# Altium footprint library PcbLib.PcbLib: 42 footprints (part 2 of 3)
Each footprint in its own frame and in the unit in brackets; x right, y up, seen from the top. Pads: shape width x height; smd on the part's side, far side on the other; paste and mask are expansions set on the pad; w line width, h text height; cw(c..) or ccw(c..) is an arc to the next point about the centre after c.
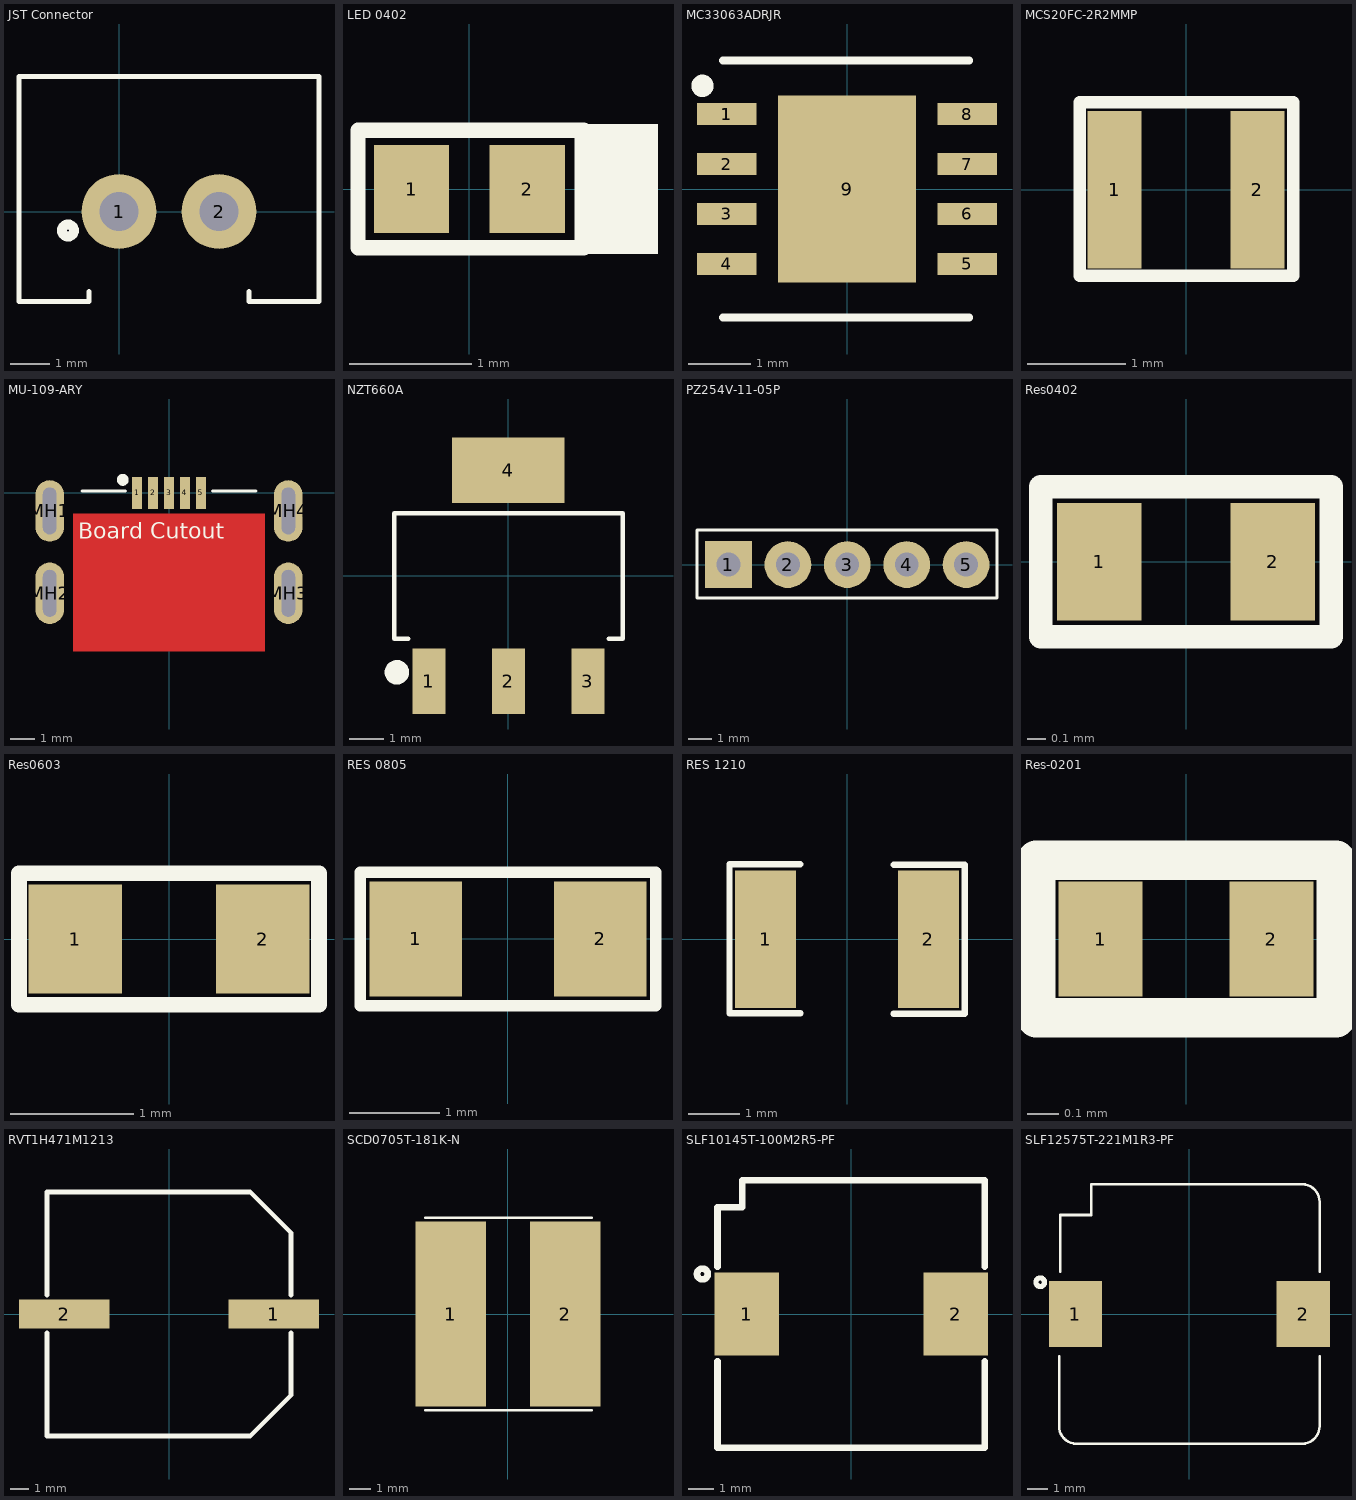
[diagram p1: the footprints below, top view; thin cyan lines are the x and y axes]

## JST Connector [mil] "2 Pin JST Connector"
pads (2):
  round 75 hole 39: 1(0,0) 2(100,0)
Top Overlay:
  circle w10: c-51,-19 r6
  lines w5: -30,-80 -30,-90 -100,-90 -100,135 200,135 200,-90 130,-90 130,-80
3D body "User Library-PW10-XX-M blue.step": height 283.59, standoff -121.92, extent -97.64,-89.41 197.64,135

## LED 0402 [mm]
pads (2):
  rect 0.62x0.72 smd: 1(-0.475,0) 2(0.475,0)
Top Overlay:
  rectangle: 0.864,-0.533 1.549,0.533
  lines w0.127: 0.94,-0.483 -0.914,-0.483 -0.914,0.483 0.94,0.483
3D body "User Library-LED-0402.step": height 0.45, standoff 0, extent -0.505,-0.25 0.505,0.25

## MC33063ADRJR [mm]
pads (10):
  rect 0.95x0.35 smd: 1(-1.925,1.2) 1(-1.925,1.2) 2(-1.925,0.4) 3(-1.925,-0.4) 4(-1.925,-1.2) 5(1.925,-1.2) 6(1.925,-0.4) 7(1.925,0.4) 8(1.925,1.2)
  rect 2.2x3 smd: 9(0,0)
Top Overlay:
  circle w0.254: c-2.311,1.651 r0.051
  lines w0.127: -1.981,-2.057 1.956,-2.057 ; -1.981,2.057 1.956,2.057
3D body "User Library-SON8-4x4mm.step": height 0.85, standoff 0, extent -2,-2 2,2

## MCS20FC-2R2MMP [mm] "IND SMD 2.2uH 1.5A"
pads (2):
  rect 0.55x1.6 smd: 1(-0.725,0) 2(0.725,0)
Top Overlay:
  lines w0.127: -1.079,-0.876 1.092,-0.876 1.092,0.889 -1.079,0.889 -1.079,-0.876
3D body "MAKK2016T1R0M.STEP": height 1, standoff 0, extent -1,-0.8 1,0.8

## MU-109-ARY [mm]
pads (9):
  rect 0.4x1.3 smd: 1(-1.3,0) 2(-0.65,0) 3(0,0) 4(0.65,0) 5(1.3,0)
  oval 1.15x2.5 hole 0.55 slot 1.9 at 90 deg: MH1(-4.85,-0.73) MH2(-4.85,-4.08) MH3(4.85,-4.08) MH4(4.85,-0.73)
Top Layer:
  pour cut-out: -3.886,-0.838 -3.886,-6.426 3.886,-6.426 3.886,-0.838
Top Overlay:
  circle w0.254: c-1.88,0.533 r0.114
  lines w0.127: -3.531,0.076 -1.778,0.076 ; 1.778,0.076 3.531,0.076
  text "Board Cutout" at -3.683,-1.854 h0.65
3D body "476421001.stp": height 1.81, standoff -0.92, extent -5.1,-6.425 5.1,0.375

## NZT660A [mm]
pads (4):
  rect 0.95x1.9 smd: 1(-2.3,-3.05) 2(0,-3.05) 3(2.3,-3.05)
  rect 3.25x1.9 smd: 4(0,3.05)
Top Overlay:
  circle w0.5: c-3.226,-2.794 r0.102
  lines w0.127: -2.896,-1.829 -3.302,-1.829 -3.302,1.803 3.302,1.803 3.302,-1.829 2.896,-1.829
3D body "User Library-SOT-223-1.step": height 1.61, standoff -0.04, extent -3.25,-3.5 3.25,3.5

## PZ254V-11-05P [mm] "Through Hole,P=2.54mm"
pads (5):
  rect 2x2 hole 1.02: 1(-5.08,0)
  round 2 hole 1.02: 2(-2.54,0) 3(0,0) 4(2.54,0) 5(5.08,0)
Top Overlay:
  lines w0.127: -6.426,-1.422 -6.426,1.473 6.401,1.473 6.401,-1.422 -6.426,-1.422
3D body "XG8V-0531.STEP": height 8.5, standoff -3, extent -6.35,-1.4 6.35,1.4

## Res0402 [mil]
pads (2):
  rect 18x25 smd mask+4: 1(-18.5,0) 2(18.5,0)
Top Overlay:
  lines w0.13: -32,-17 32,-17
  lines w5: -31,-16 31,-16 31,16 -31,16 -31,-16
3D body "User Library-RES_1005-0402.step": height 16.14, standoff 0, extent -22.63,-10.82 22.64,10.83

## Res0603 [mil]
pads (2):
  rect 30x35 smd: 1(-30,0) 2(30,0)
Top Overlay:
  lines w5: -48,-21 48,-21 48,21 -48,21 -48,-21
3D body "User Library-RESC1608X05N.step": height 17.76, standoff 0, extent -30.52,-16.74 30.51,16.73

## RES 0805 [mil] "SMD 0805"
pads (2):
  rect 40x50 smd: 1(-40,0) 2(40,0)
Top Overlay:
  lines w5: -64,-29 64,-29 64,29 -64,29 -64,-29
3D body "User Library-CR2012-0805.STEP": height 23.62, standoff 0, extent -39.34,-24.75 39.4,24.46

## RES 1210 [mm]
pads (2):
  rect 1.2x2.7 smd: 1(-1.6,0) 2(1.6,0)
Top Overlay:
  lines w0.127: -0.918,1.473 -2.311,1.473 -2.311,-1.46 -0.914,-1.46 ; 0.915,-1.467 2.312,-1.467 2.312,1.467 0.919,1.467
3D body "User Library-R_1210.step": height 0.6, standoff 0, extent -1.6,-1.25 1.6,1.25

## Res-0201 [mm]
pads (2):
  rect 0.27x0.37 smd: 1(-0.275,0) 2(0.275,0)
Top Overlay:
  lines w0.127: -0.483,-0.254 -0.483,0.254 0.483,0.254 0.483,-0.254 -0.483,-0.254
3D body "User Library-0201(0603M) Res.step": height 0.29, standoff -0.02, extent -0.305,-0.152 0.305,0.153

## RVT1H471M1213 [mm]
pads (2):
  rect 5x1.6 smd: 1(5.8,0) 2(-5.8,0)
Top Overlay:
  lines w0.254: -6.75,-1.031 -6.75,-6.75 4.5,-6.75 6.75,-4.5 6.75,-1.031 ; -6.75,1.031 -6.75,6.75 4.5,6.75 6.75,4.5 6.75,1.031

## SCD0705T-181K-N [mm]
pads (2):
  rect 3.35x8.8 smd: 1(-2.725,0) 2(2.725,0)
Top Overlay:
  lines w0.127: -3.938,-4.572 3.962,-4.572 ; -3.938,4.572 3.962,4.572
3D body "SND0705.STEP": height 5.1, standoff 0, extent -3.917,-3.5 3.909,3.5

## SLF10145T-100M2R5-PF [mm]
pads (2):
  rect 2.5x3.2 smd: 1(-4.05,0) 2(4.05,0)
Top Overlay:
  circle w0.254: c-5.766,1.549 r0.209
  lines w0.254: -5.182,-1.829 -5.182,-5.182 5.182,-5.182 5.182,-1.829 ; -5.182,1.829 -5.182,4.115 ; -5.182,4.14 -4.216,4.14 -4.216,5.182 5.182,5.182 5.182,1.829
3D body "User Library-SLF10145.STEP": height 4.5, standoff 0, extent -5.06,-5.05 5.06,5.05

## SLF12575T-221M1R3-PF [mm]
pads (2):
  rect 2.6x3.2 smd: 1(-5.55,0) 2(5.55,0)
Top Overlay:
  circle w0.254: c-7.266,1.549 r0.209
  lines w0.127: -6.35,-2.057 -6.35,-5.461 ccw(c-5.499,-5.474) -5.512,-6.325 5.512,-6.325 ccw(c5.499,-5.474) 6.35,-5.461 6.35,-2.057 ; -6.299,2.057 -6.299,4.826 -4.775,4.826 -4.775,6.325 5.512,6.325 cw(c5.499,5.474) 6.35,5.461 6.35,2.057
3D body "slf12575.step": height 7.5, standoff 0, extent -6.275,-6.326 6.325,6.274